# Altium footprint library Akcelerometr.PcbLib: 1 footprints
Each footprint in its own frame and in the unit in brackets; x right, y up, seen from the top. Pads: shape width x height; smd on the part's side, far side on the other; paste and mask are expansions set on the pad; w line width, h text height; cw(c..) or ccw(c..) is an arc to the next point about the centre after c.
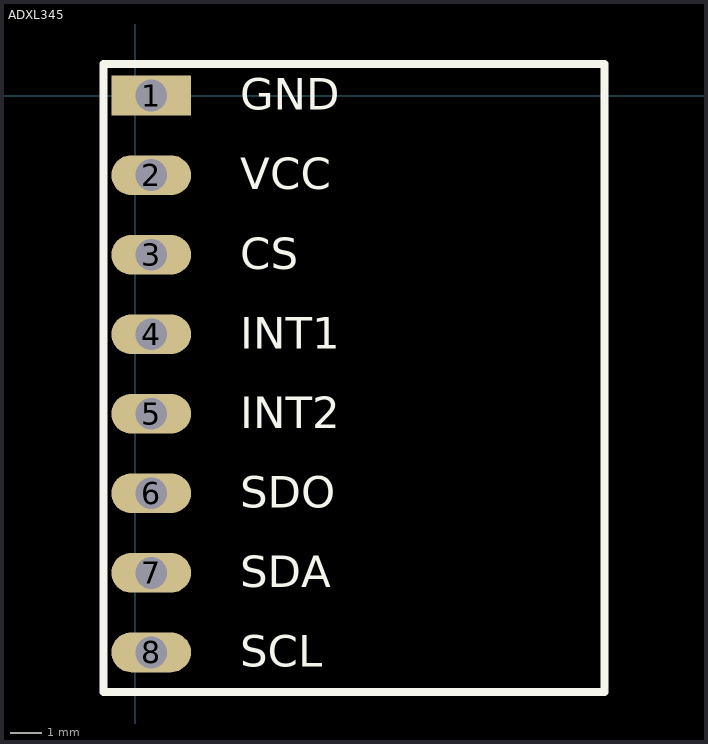
[diagram p0: the footprint, top view; thin cyan lines are the x and y axes]

## ADXL345 [mil]
pads (8):
  rect 100x50 hole 40: 1(20,0)
  oval 100x50 hole 40: 2(20,-100) 3(20,-200) 4(20,-300) 5(20,-400) 6(20,-500) 7(20,-600) 8(20,-700)
Top Overlay:
  lines w10: -40,-750 -40,40 590,40 590,-750 -40,-750
  text "SCL" at 132,-718 h40
  text "SDA" at 132,-618 h40
  text "SDO" at 132,-518 h40
  text "INT2" at 132,-418 h40
  text "INT1" at 132,-318 h40
  text "CS" at 132,-218 h40
  text "VCC" at 132,-118 h40
  text "GND" at 132,-18 h40